# Altium schematic symbol library 521-8559F.SchLib: 1 symbol
Pins are listed as number, name and electrical type; pins without a type are passive.

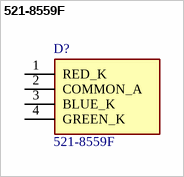
[diagram p0: symbol 521-8559F]

## 521-8559F
designator D?
Standard LEDs - Through Hole 5mm RGB WC LED w4 leads; Manufacturer_Name: Dialight; Geometry.Height: 8.6mm; Mouser Part Number: 645-5218559F; Mouser Price/Stock: https://www.mouser.co.uk/ProductDetail/Dialight/521-8559F?qs=vmHwEFxEFR%2FyCJVY9sdZTA%3D%3D; Manufacturer_Part_Number: 521-8559F; Datasheet Link: *
footprint 5218559F
pins: 1 RED_K, 2 COMMON_A, 3 BLUE_K, 4 GREEN_K